# Altium schematic symbol library 2019-10-13_18-26-35.SchLib: 1 symbol
Pins are listed as number, name and electrical type; pins without a type are passive.

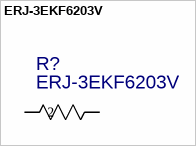
[diagram p0: symbol ERJ-3EKF6203V]

## ERJ-3EKF6203V
designator R?
C: Copyright (C) 2015 Accelerated Designs. All rights reserved; Vendor: Panasonic; Built_By: EMA_UL_Team; Manufacturer_Part_Number: ERJ-3EKF6203V; Value: ERJ-3EKF6203V
footprint RC0603N
pins: 1, 2
1 alternate drawing of the same symbol